# Altium footprint library Clema_SJ.PcbLib: 1 footprints
Each footprint in its own frame and in the unit in brackets; x right, y up, seen from the top. Pads: shape width x height; smd on the part's side, far side on the other; paste and mask are expansions set on the pad; w line width, h text height; cw(c..) or ccw(c..) is an arc to the next point about the centre after c.
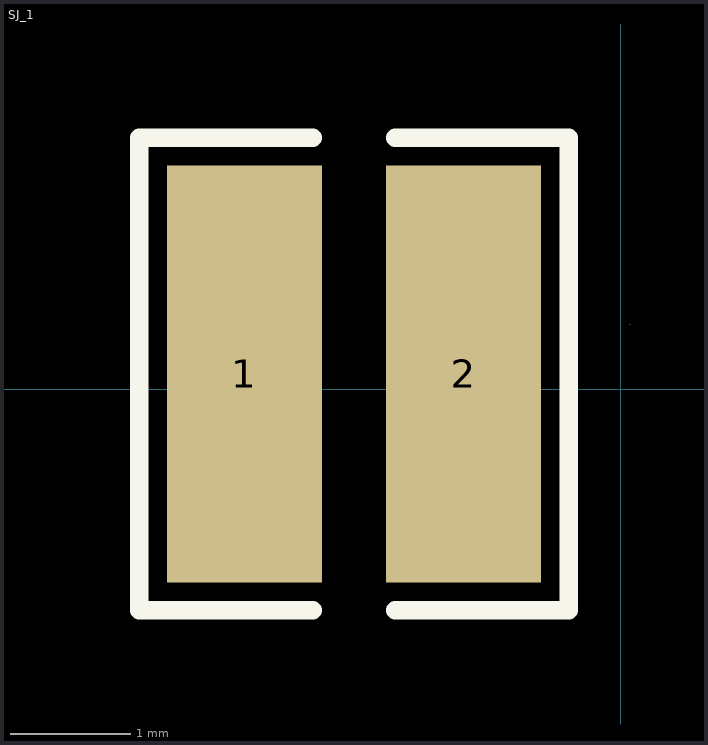
[diagram p0: the footprint, top view; thin cyan lines are the x and y axes]

## SJ_1 [mm]
pads (2):
  rect 1.283x3.456 smd paste-100 mask+0.051: 1(-3.118,0.128) 2(-1.303,0.128)
Top Overlay:
  lines w0.152: -2.553,-1.829 -3.988,-1.829 -3.988,2.084 -2.553,2.084 ; -1.868,-1.829 -0.434,-1.829 -0.434,2.084 -1.868,2.084
Top Paste:
  region: -2.477,-1.5 -2.477,-0.56 -2.577,-0.46 -2.813,-0.46 -2.913,-0.36 -2.913,0.615 -2.813,0.715 -2.577,0.715 -2.477,0.815 -2.477,1.756 -2.577,1.856 -3.659,1.856 -3.759,1.756 -3.759,-1.5 -3.659,-1.6 -2.577,-1.6
  region: -1.945,-1.5 -1.945,-0.56 -1.845,-0.46 -1.609,-0.46 -1.509,-0.36 -1.509,0.615 -1.609,0.715 -1.845,0.715 -1.945,0.815 -1.945,1.756 -1.845,1.856 -0.762,1.856 -0.662,1.756 -0.662,-1.5 -0.762,-1.6 -1.845,-1.6
Mechanical 15:
  lines w0.003: 0.075,0.54 0.076,0.54